# Altium schematic symbol library 其他.SchLib: 3 symbols
Pins are listed as number, name and electrical type; pins without a type are passive.

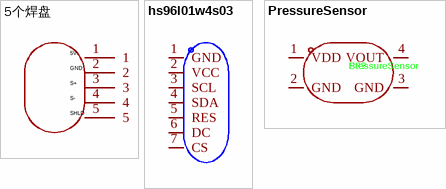
[diagram p0: symbols 5个焊盘 to PressureSensor]

## 5个焊盘
designator U??  (value not drawn)
Convert to PCB: yes; Device: 5个焊盘; Add into BOM: yes; Symbol: 5个焊盘
pins: 1, 2, 3, 4, 5
text: 5V; GND; S+; S-; SHLD

## hs96l01w4s03
designator OLED??  (value not drawn)
接口类型:SPI;尺寸(inch):0.96;像素分辨率:128x64;; Manufacturer: HS(汉昇); AddInBom: yes; ModelId: 7927fe0e3c8842749d8ccfcaf6d2f492; ModelName: OLED-TH_HS96L01W4S03; ModelTransform: 1074.801,1094.486,0,0,0,0,0,-488.188,-157.48; Interface: SPI; Dot Pixels: 128x64; Type of Drive: 无源(PMOLED); Display Range: 21.74x10.86mm; Display Color: 白色; Luminance: 100cd/m2; Quiescent Current: 5uA; Voltage - Supply  For Logic: 1.65V~3.3V; Symbol: HS96L01W4S03; LCSC Part Name: 0.96寸 白光 128x64像素分辨率; SupplierPart: C5139758; ManufacturerPart: HS96L01W4S03; Supplier Footprint: -; JLCPCB Part Class: Extended Part; Datasheet: https://item.szlcsc.com/datasheet/HS96L01W4S03/5751920.html; Supplier: LCSC; ConvertToPcb: yes; FootprintName: OLED-TH_HS96L01W4S03; Size: 0.96; Operating Temperature: -40℃~+80℃
footprint 0.96OLED-7P
pins: 1 GND, 2 VCC, 3 SCL, 4 SDA, 5 RES, 6 DC, 7 CS

## PressureSensor
designator S??
模拟压力传感器; Manufacturer Part: MAX40200AUK+T; Add into BOM: yes; Supplier Footprint: SOT-23-5; JLCPCB Part Class: Extended Part; Datasheet: https://atta.szlcsc.com/upload/public/pdf/source/20210603/11AAC644196C350B02B9F99D47093F30.pdf; Supplier: LCSC; Convert to PCB: yes
footprint PressureSensor
pins: 1 VDD, 2 GND, 3 GND, 4 VOUT